# Altium footprint library 2020-12-05_08-21-53.PcbLib: 1 footprints
Each footprint in its own frame and in the unit in brackets; x right, y up, seen from the top. Pads: shape width x height; smd on the part's side, far side on the other; paste and mask are expansions set on the pad; w line width, h text height; cw(c..) or ccw(c..) is an arc to the next point about the centre after c.
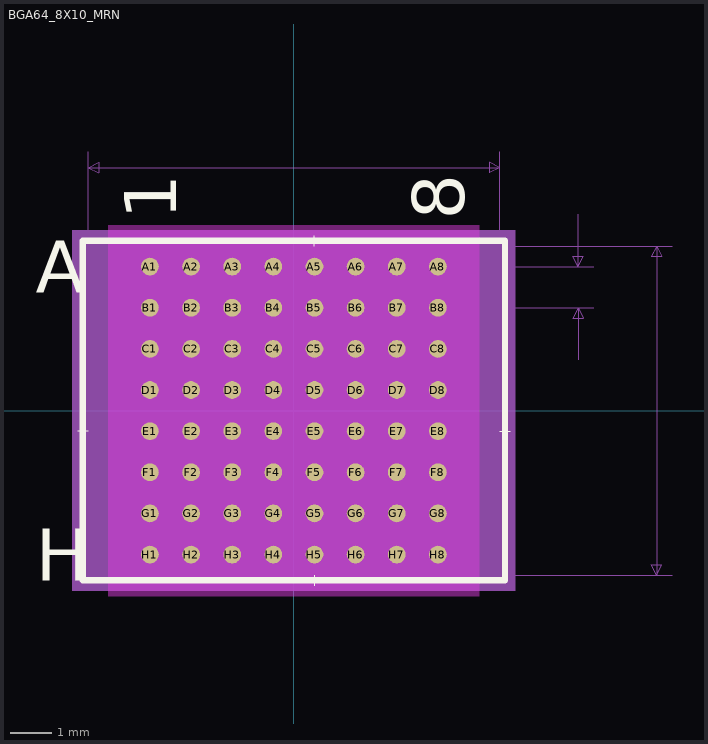
[diagram p0: the footprint, top view; thin cyan lines are the x and y axes]

## BGA64_8X10_MRN [mm]
pads (64):
  round 0.432 smd paste+0 mask+0: A1(-3.5,3.5) A2(-2.5,3.5) A3(-1.5,3.5) A4(-0.5,3.5) A5(0.5,3.5) A6(1.5,3.5) A7(2.5,3.5) A8(3.5,3.5) B1(-3.5,2.5) B2(-2.5,2.5) B3(-1.5,2.5) B4(-0.5,2.5) B5(0.5,2.5) B6(1.5,2.5) B7(2.5,2.5) B8(3.5,2.5) C1(-3.5,1.5) C2(-2.5,1.5) C3(-1.5,1.5) C4(-0.5,1.5) C5(0.5,1.5) C6(1.5,1.5) C7(2.5,1.5) C8(3.5,1.5) D1(-3.5,0.5) D2(-2.5,0.5) D3(-1.5,0.5) D4(-0.5,0.5) D5(0.5,0.5) D6(1.5,0.5) D7(2.5,0.5) D8(3.5,0.5) E1(-3.5,-0.5) E2(-2.5,-0.5) E3(-1.5,-0.5) E4(-0.5,-0.5) E5(0.5,-0.5) E6(1.5,-0.5) E7(2.5,-0.5) E8(3.5,-0.5) F1(-3.5,-1.5) F2(-2.5,-1.5) F3(-1.5,-1.5) F4(-0.5,-1.5) F5(0.5,-1.5) F6(1.5,-1.5) F7(2.5,-1.5) F8(3.5,-1.5) G1(-3.5,-2.5) G2(-2.5,-2.5) G3(-1.5,-2.5) G4(-0.5,-2.5) G5(0.5,-2.5) G6(1.5,-2.5) G7(2.5,-2.5) G8(3.5,-2.5) H1(-3.5,-3.5) H2(-2.5,-3.5) H3(-1.5,-3.5) H4(-0.5,-3.5) H5(0.5,-3.5) H6(1.5,-3.5) H7(2.5,-3.5) H8(3.5,-3.5)
Top Overlay:
  lines w0.025: -5.258,-0.5 -5.004,-0.5 ; 0.5,-4.255 0.5,-4 ; 0.5,4 0.5,4.255 ; 5.004,-0.5 5.258,-0.5
  lines w0.152: -5.131,-4.127 5.131,-4.127 5.131,4.127 -5.131,4.127 -5.131,-4.127
  text "A" at -6.274,2.865 h1.27
  text "H" at -6.274,-4.135 h1.27
  text "1" at -2.865,4.635 h1.27
  text "8" at 4.135,4.635 h1.27
Bottom Overlay:
  text "A" at -5.639,2.865 h1.27
  text "H" at -5.639,-4.135 h1.27
  text "1" at -4.135,4.635 h1.27
  text "8" at 2.865,4.635 h1.27
Keep-Out Layer:
  region: -4.508,-4.508 -4.508,4.508 4.508,4.508 4.508,-4.508
Mechanical 5:
  region: 5.385,-4.381 -5.385,-4.381 -5.385,4.381 5.385,4.381
Mechanical 7:
  lines w0.025: -5.004,0 -5.004,6.286 ; 0,-4 9.195,-4 ; 0,4 9.195,4 ; 3.5,2.5 7.29,2.5 ; 3.5,3.5 7.29,3.5 ; 5.004,0 5.004,6.286 ; 6.909,1.23 6.909,2.5 ; 6.909,4.77 6.909,3.5 ; -5.004,5.905 5.004,5.905 ; -5.004,5.905 -4.75,6.032 -4.75,5.779 -5.004,5.905 ; 5.004,5.905 4.75,6.032 4.75,5.779 5.004,5.905 ; 6.909,2.5 6.782,2.246 7.036,2.246 6.909,2.5 ; 6.909,3.5 6.782,3.754 7.036,3.754 6.909,3.5 ; 8.814,-4 8.814,4 ; 8.814,-4 8.687,-3.746 8.941,-3.746 8.814,-4 ; 8.814,4 8.687,3.746 8.941,3.746 8.814,4
  text "Default Padstyle: EX17Y17D0T" at -8.89,-9.08 h1.27
  text "0.039in/1mm" at 7.417,2.682 h0.64
  text "0.394in/10.008mm" at -2.54,6.413 h0.64
  text "0.315in/8.001mm" at 9.322,-0.318 h0.64
Mechanical 13:
  lines w0.025: -5.004,3.501 -4.504,4 ; -5.004,-4 5.004,-4 5.004,4 -5.004,4 -5.004,-4
  text "A" at -6.274,2.865 h1.27
  text "H" at -6.274,-4.135 h1.27
  text "1" at -2.865,4.635 h1.27
  text "8" at 4.135,4.635 h1.27
Mechanical 15:
  region: 5.258,-4.255 -5.258,-4.255 -5.258,4.255 5.258,4.255
  lines w0.152: -5.258,-4.255 -5.258,4.255 5.258,4.255 5.258,-4.255 -5.258,-4.255
3D body: height 0.25, standoff 0, extent 0,0 0.254,0.254